# Altium footprint library Crystals Oscillators.PcbLib: 38 footprints (part 2 of 3)
Each footprint in its own frame and in the unit in brackets; x right, y up, seen from the top. Pads: shape width x height; smd on the part's side, far side on the other; paste and mask are expansions set on the pad; w line width, h text height; cw(c..) or ccw(c..) is an arc to the next point about the centre after c.
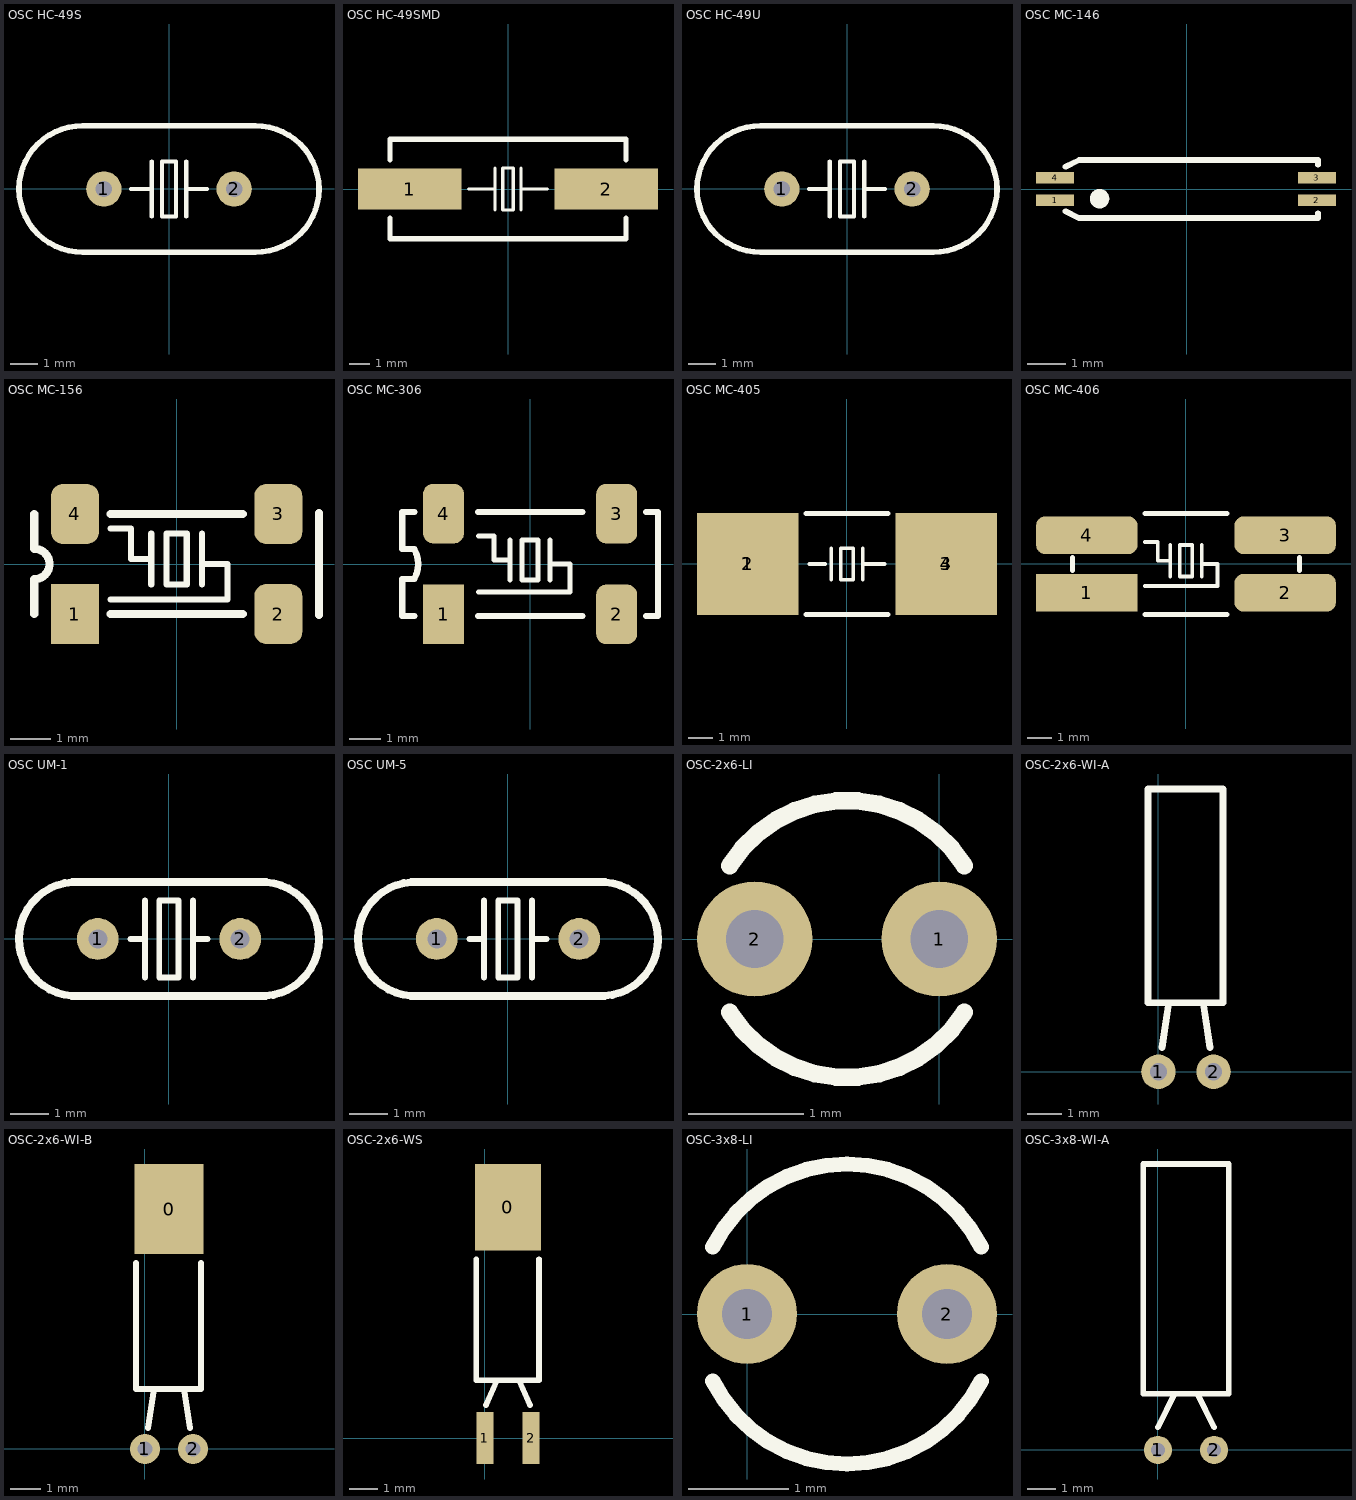
[diagram p1: the footprints below, top view; thin cyan lines are the x and y axes]

## OSC HC-49S [mm]
pads (2):
  round 1.3 hole 0.6: 1(-2.4,0) 2(2.4,0)
Top Overlay:
  lines w0.152: -1.397,0 -0.635,0 ; -0.635,-1.016 -0.635,1.016 ; 0.635,-1.016 0.635,1.016 ; 0.635,0 1.397,0 ; -0.254,-1.016 -0.254,1.016 0.254,1.016 0.254,-1.016 -0.254,-1.016
  lines w0.203: -3.175,2.325 ccw(c-3.2,0) -3.173,-2.325 3.175,-2.325 ccw(c3.2,0) 3.173,2.325 -3.175,2.325
3D body "OSC HC-49S.STEP": height 4.13, standoff -3.45, extent -5.525,-2.286 5.525,2.364

## OSC HC-49SMD [mm]
pads (2):
  rect 5x2 smd: 1(-4.75,0) 2(4.75,0)
Top Overlay:
  lines w0.152: -1.905,0 -0.635,0 ; -0.635,-1.016 -0.635,1.016 ; 0.635,-1.016 0.635,1.016 ; 0.635,0 1.905,0 ; -0.254,-1.016 0.254,-1.016 0.254,1.016 -0.254,1.016 -0.254,-1.016
  lines w0.254: -5.7,-1.397 -5.7,-2.4 5.7,-2.4 5.7,-1.397 ; -5.7,1.397 -5.7,2.4 5.7,2.4 5.7,1.397
3D body "OSC HC-49SMD.STEP": height 4.63, standoff 0.05, extent -6.373,-2.413 6.627,2.237

## OSC HC-49U [mm]
pads (2):
  round 1.3 hole 0.6: 1(-2.4,0) 2(2.4,0)
Top Overlay:
  lines w0.152: -1.397,0 -0.635,0 ; -0.635,-1.016 -0.635,1.016 ; 0.635,-1.016 0.635,1.016 ; 0.635,0 1.397,0 ; -0.254,-1.016 -0.254,1.016 0.254,1.016 0.254,-1.016 -0.254,-1.016
  lines w0.203: -3.175,2.325 ccw(c-3.2,0) -3.173,-2.325 3.175,-2.325 ccw(c3.2,0) 3.173,2.325 -3.175,2.325
3D body "OSC HC-49U.STEP": height 13.95, standoff -3.45, extent -5.525,-2.286 5.525,2.364

## OSC MC-146 [mm]
pads (4):
  rect 1x0.3 smd: 1(-3.45,-0.3) 2(3.4,-0.3) 3(3.4,0.3) 4(-3.45,0.3)
Top Overlay:
  circle w0.254: c-2.286,-0.254 r0.127
  lines w0.152: -3.175,-0.584 -2.819,-0.762 3.429,-0.762 3.429,-0.635 ; -3.175,0.584 -2.819,0.762 3.429,0.762 3.429,0.635
3D body "OSC MC-146.STEP": height 1.45, standoff 0.04, extent -3.323,-0.762 3.577,0.738

## OSC MC-156 [mm]
pads (4):
  rect 1.2x1.5 smd: 1(-2.54,-1.25)
  rrect50% 1.2x1.5 smd: 2(2.54,-1.25) 3(2.54,1.25) 4(-2.54,1.25)
Top Overlay:
  lines w0.152: -1.651,-0.889 1.27,-0.889 1.27,0 0.635,0 ; -1.651,0.889 -1.143,0.889 -1.143,0.127 -0.889,0.127 -0.635,0.127 ; -0.635,-0.508 -0.635,0.762 ; 0.635,-0.508 0.635,0.762 ; -0.254,-0.508 -0.254,0.762 0.254,0.762 0.254,-0.508 -0.254,-0.508
  lines w0.203: -3.556,-1.25 -3.556,-0.381 ccw(c-3.556,0) -3.556,0.381 -3.556,1.25 ; -1.651,-1.25 1.651,-1.25 ; -1.651,1.25 1.651,1.25 ; 3.556,-1.27 3.556,1.27
3D body "OSC MC-156.STEP": height 1.5, standoff 0.03, extent -3.55,-1.651 3.55,1.649

## OSC MC-306 [mm]
pads (4):
  rect 1.3x1.9 smd: 1(-2.75,-1.6)
  rrect50% 1.3x1.9 smd: 2(2.75,-1.6) 3(2.75,1.6) 4(-2.75,1.6)
Top Overlay:
  lines w0.152: -1.651,-0.889 1.27,-0.889 1.27,0 0.635,0 ; -1.651,0.889 -1.143,0.889 -1.143,0.127 -0.889,0.127 -0.635,0.127 ; -0.635,-0.508 -0.635,0.762 ; 0.635,-0.508 0.635,0.762 ; -0.254,-0.508 0.254,-0.508 0.254,0.762 -0.254,0.762 -0.254,-0.508
  lines w0.203: -3.683,-1.651 -4.064,-1.651 -4.064,-0.476 -3.683,-0.476 ccw(c-4.512,0) -3.683,0.476 -4.064,0.476 -4.064,1.651 -3.683,1.651 ; -1.651,-1.651 1.651,-1.651 ; -1.651,1.651 1.651,1.651 ; 3.683,-1.651 4.064,-1.651 4.064,1.651 3.683,1.651
3D body "OSC MC-306.STEP": height 2.56, standoff 0, extent -4,-1.524 4,1.736

## OSC MC-405 [mm]
pads (4):
  rect 4.1x4.1 smd: 1(-4,0) 2(-4,0) 3(4,0) 4(4,0)
Top Overlay:
  lines w0.152: -1.524,0 -0.889,0 ; -0.635,-0.635 -0.635,0.635 ; 0.635,-0.635 0.635,0.635 ; 0.635,0 1.524,0 ; -0.254,-0.635 0.254,-0.635 0.254,0.635 -0.254,0.635 -0.254,-0.635
  lines w0.203: -1.651,-2.032 1.651,-2.032 ; -1.651,2.032 1.651,2.032
3D body "OSC MC-405.STEP": height 3.4, standoff -0.05, extent -4.515,-2.028 5.785,2.032

## OSC MC-406 [mm]
pads (4):
  rect 4.1x1.52 smd: 1(-4,-1.16)
  rrect50% 4.1x1.52 smd: 2(4,-1.16) 3(4,1.16) 4(-4,1.16)
Top Overlay:
  lines w0.152: -1.651,-0.889 1.27,-0.889 1.27,0 0.635,0 ; -1.651,0.889 -1.143,0.889 -1.143,0.127 -0.889,0.127 -0.635,0.127 ; -0.635,-0.508 -0.635,0.762 ; 0.635,-0.508 0.635,0.762 ; -0.254,-0.508 0.254,-0.508 0.254,0.762 -0.254,0.762 -0.254,-0.508
  lines w0.203: -4.572,-0.254 -4.572,0.254 ; -1.651,-2.032 1.651,-2.032 ; -1.651,2.032 1.651,2.032 ; 4.572,-0.254 4.572,0.254
3D body "OSC MC-406.STEP": height 3.4, standoff -0.05, extent -5.15,-2.032 5.15,2.028

## OSC UM-1 [mm]
pads (2):
  round 1.1 hole 0.5: 1(-1.875,0) 2(1.875,0)
Top Overlay:
  lines w0.152: -1.016,0 -0.635,0 ; -0.635,-1.016 -0.635,1.016 ; 0.635,-1.016 0.635,1.016 ; 0.635,0 1.016,0 ; -0.254,-1.016 -0.254,1.016 0.254,1.016 0.254,-1.016 -0.254,-1.016
  lines w0.203: -2.556,-1.5 2.54,-1.5 ccw(c2.452,-0.003) 2.558,1.493 ; -2.556,-1.496 cw(c-2.45,0) -2.538,1.497 ; -2.538,1.5 2.558,1.5
3D body "OSC UM-1.STEP": height 8.05, standoff -3.45, extent -3.95,-1.476 3.95,1.524

## OSC UM-5 [mm]
pads (2):
  round 1.1 hole 0.5: 1(-1.875,0) 2(1.875,0)
Top Overlay:
  lines w0.152: -1.016,0 -0.635,0 ; -0.635,-1.016 -0.635,1.016 ; 0.635,-1.016 0.635,1.016 ; 0.635,0 1.016,0 ; -0.254,-1.016 -0.254,1.016 0.254,1.016 0.254,-1.016 -0.254,-1.016
  lines w0.203: -2.556,-1.5 2.54,-1.5 ccw(c2.452,-0.003) 2.558,1.493 ; -2.556,-1.496 cw(c-2.45,0) -2.538,1.497 ; -2.538,1.5 2.558,1.5
3D body "OSC UM-5.STEP": height 6.05, standoff -3.45, extent -3.95,-1.524 3.95,1.476

## OSC-2x6-LI [mm]
pads (2):
  round 1 hole 0.5: 1(0,0) 2(-1.6,0)
Top Overlay:
  lines w0.152: -1.818,-0.636 ccw(c-0.8,0) 0.218,-0.636 ; -1.818,0.636 cw(c-0.8,0) 0.218,0.636
3D body "OSC-2x6-LI-.STEP": height 7.1, standoff -2.45, extent -1.762,-1.016 0.238,0.984

## OSC-2x6-WI-A [mm]
pads (2):
  round 1 hole 0.5: 1(0,0) 2(1.6,0)
Top Overlay:
  lines w0.2: 0.1,0.7 0.3,2 ; 1.3,2 1.5,0.7 ; -0.3,2 1.872,2 1.872,8.2 -0.3,8.2 -0.3,2
3D body "OSC-2x6-WI-A.STEP": height 2.05, standoff -2.6, extent -0.254,-0.142 1.746,8.016

## OSC-2x6-WI-B [mm]
pads (3):
  rect 2.3x3 smd: 0(0.8,8)
  round 1 hole 0.5: 1(0,0) 2(1.6,0)
Top Overlay:
  lines w0.2: -0.3,6.2 -0.3,2 1.872,2 1.872,6.2 ; 0.1,0.7 0.3,2 ; 1.3,2 1.5,0.7
3D body "OSC-2x6-WI-B.STEP": height 2.05, standoff -2.6, extent -0.254,-0.142 1.746,8.016

## OSC-2x6-WS [mm]
pads (3):
  rect 2.3x3 smd: 0(0.8,8)
  rect 0.6x1.8 smd: 1(0,0) 2(1.6,0)
Top Overlay:
  lines w0.2: -0.3,6.2 -0.3,2 1.872,2 1.872,6.2 ; 0.038,1.143 0.419,2 ; 1.181,2 1.562,1.143
3D body "OSC-2x6-WS-.STEP": height 2.01, standoff -0.04, extent -0.222,-0.49 1.778,8.11

## OSC-3x8-LI [mm]
pads (2):
  round 1 hole 0.5: 1(0,0) 2(2,0)
Top Overlay:
  lines w0.152: -0.342,-0.671 ccw(c1,0) 2.342,-0.671 ; -0.342,0.671 cw(c1,0) 2.342,0.671
3D body "OSC-3x8-LI-.STEP": height 9.1, standoff -2.5, extent -0.484,-1.476 2.516,1.524

## OSC-3x8-WI-A [mm]
pads (2):
  round 1 hole 0.5: 1(0,0) 2(2,0)
Top Overlay:
  lines w0.2: 0,0.8 0.6,2 ; 1.4,2 2,0.8 ; -0.524,2 -0.524,10.16 2.524,10.16 2.524,2 -0.524,2
3D body "OSC-3x8-WI-A.STEP": height 3.03, standoff -2.6, extent -0.484,-0.127 2.516,10.052